# Altium footprint library 2606-1102.PcbLib: 1 footprints
Each footprint in its own frame and in the unit in brackets; x right, y up, seen from the top. Pads: shape width x height; smd on the part's side, far side on the other; paste and mask are expansions set on the pad; w line width, h text height; cw(c..) or ccw(c..) is an arc to the next point about the centre after c.
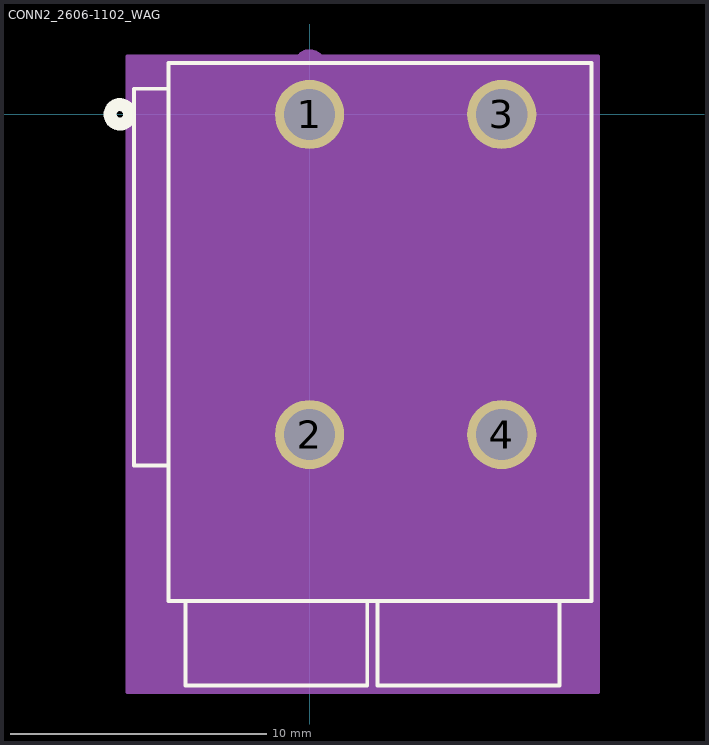
[diagram p0: the footprint, top view; thin cyan lines are the x and y axes]

## CONN2_2606-1102_WAG [mm]
pads (4):
  round 2.7 / inner round 1.524 / far side round 2.7 hole 2 paste-1.35 mask+0: 1(0,0) 2(0,-12.5) 3(7.5,0) 4(7.5,-12.5)
Top Overlay:
  circle w0.508: c-7.405,0 r0.381
  lines w0.152: -5.5,-13.7 -6.85,-13.7 -6.85,1 -5.5,1 ; -4.85,-19 -4.85,-22.3 2.25,-22.3 2.25,-19 ; 2.65,-19 2.65,-22.3 9.75,-22.3 9.75,-19 ; -5.5,-19 11,-19 11,2 -5.5,2 -5.5,-19
Bottom Overlay:
  circle w0.508: c-7.405,0 r0.381
Mechanical 13:
  circle w0.508: c0,1.905 r0.381
  lines w0.025: -5.5,-13.7 -6.85,-13.7 -6.85,1 -5.5,1 ; -4.85,-19 -4.85,-22.3 2.25,-22.3 2.25,-19 ; 2.65,-19 2.65,-22.3 9.75,-22.3 9.75,-19 ; -5.5,-19 11,-19 11,2 -5.5,2 -5.5,-19
Mechanical 15:
  region: 11.254,2.254 -7.104,2.254 -7.104,-22.554 11.254,-22.554
  lines w0.152: -7.104,-22.554 -7.104,2.254 ; -7.104,-22.554 -7.104,2.254 ; -7.104,-22.554 11.254,-22.554 11.254,2.254 -7.104,2.254